# Altium footprint library SYNCBOX_V3I1.PcbLib: 251 footprints (part 7 of 16)
Each footprint in its own frame and in the unit in brackets; x right, y up, seen from the top. Pads: shape width x height; smd on the part's side, far side on the other; paste and mask are expansions set on the pad; w line width, h text height; cw(c..) or ccw(c..) is an arc to the next point about the centre after c.
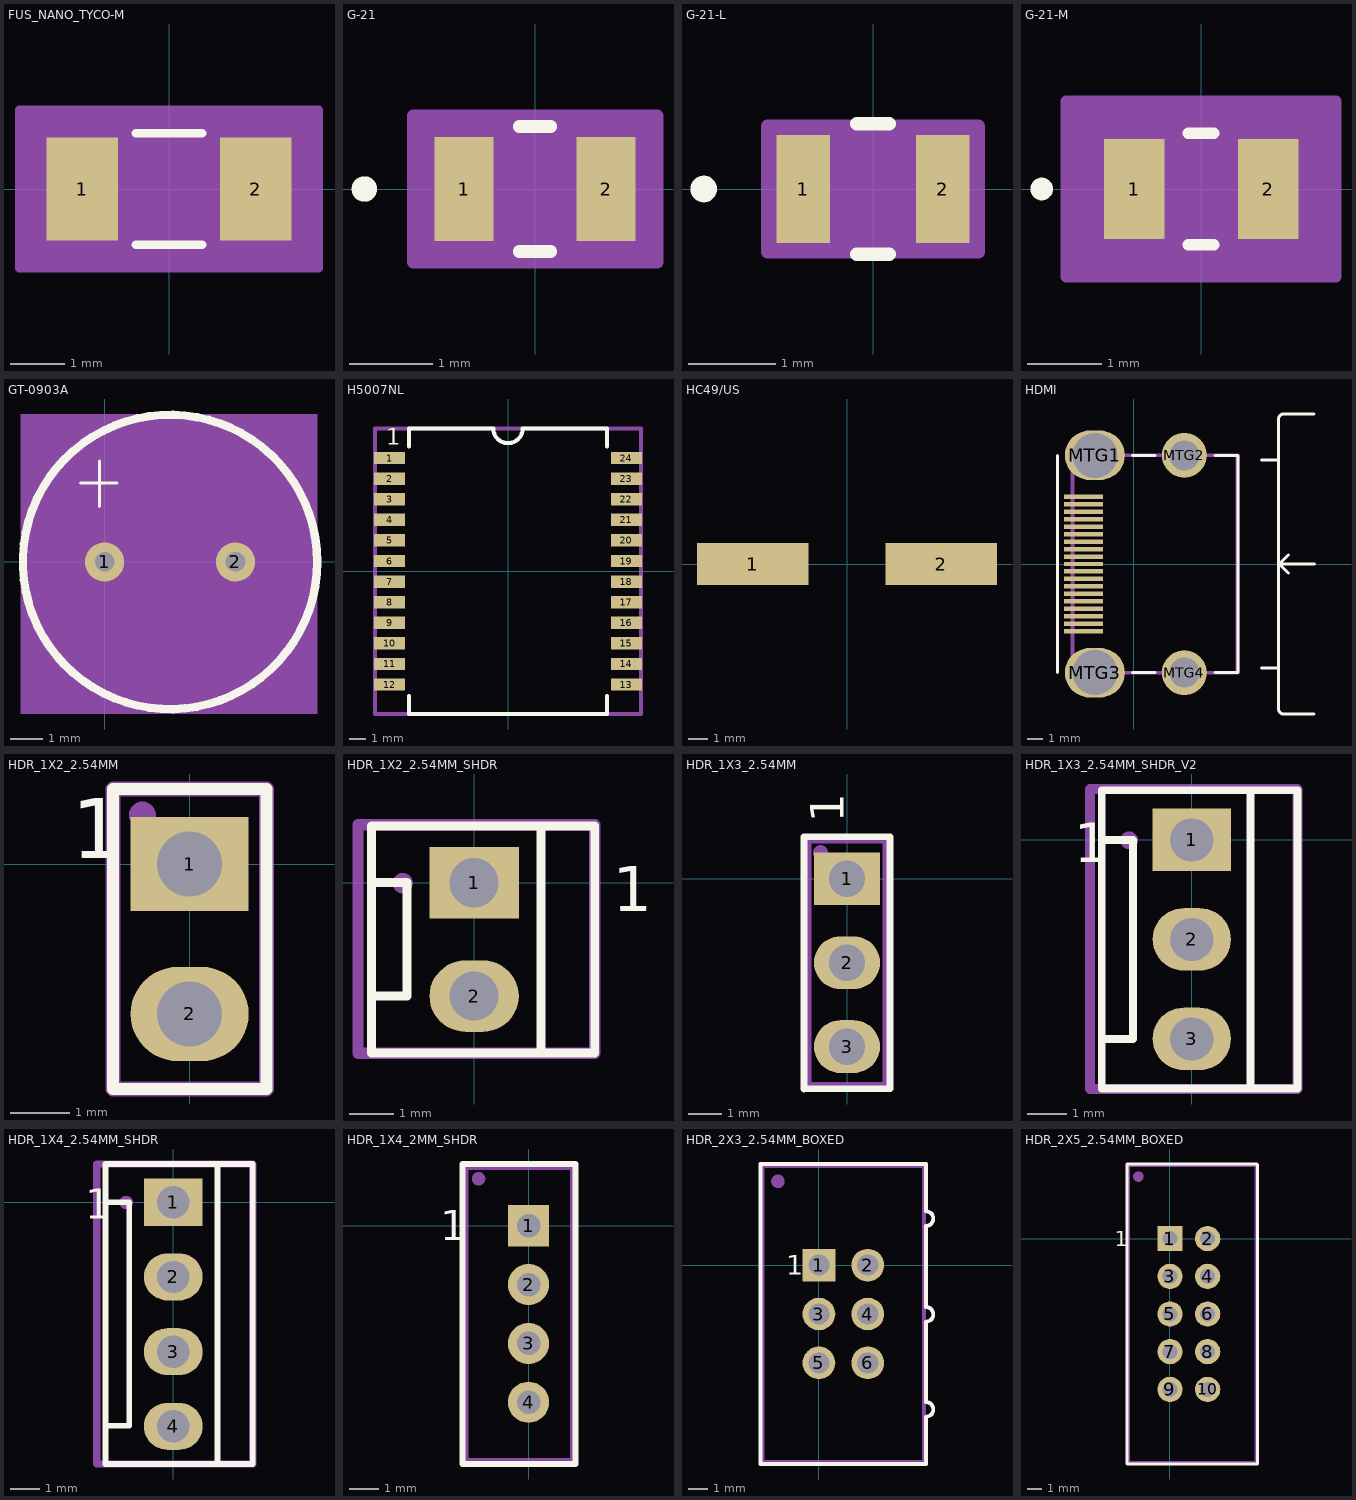
[diagram p6: the footprints below, top view; thin cyan lines are the x and y axes]

## FUS_NANO_TYCO-M [mil]
pads (2):
  rect 52x75 smd paste+0 mask+0: 1(-63,0) 2(63,0)
Top Overlay:
  lines w6: -24.25,-40.5 24.25,-40.5 ; -24.25,40.5 24.25,40.5
Mechanical 13:
  lines w1: -67,-35.5 -67,35.5 ; -67,-35.5 -37,-35.5 -37,35.5 -67,35.5 ; -67,-35.5 67,-35.5 ; -67,-35.5 -67,35.5 ; -67,35.5 67,35.5 ; 67,-35.5 37,-35.5 37,35.5 67,35.5 ; 67,-35.5 67,35.5 ; 67,-35.5 67,35.5
Mechanical 15:
  region: 109,-57.5 -109,-57.5 -109,57.5 109,57.5
  lines w6: -109,-57.5 -109,57.5 109,57.5 109,-57.5 -109,-57.5
3D body "FUS_NANO_TYCO-M.step": height 39.02, standoff 0, extent -67,-35.51 67.01,35.51
3D body: height 10, standoff 0, extent 0,0 10,10

## G-21 [mil]
pads (2):
  rect 28x49 smd paste+0 mask+0: 1(-33.5,0) 2(33.5,0)
Top Overlay:
  circle w6: c-80.5,0 r3
  lines w6: -7.39,-29.5 7.39,-29.5 ; -7.39,29.5 7.39,29.5
Mechanical 13:
  circle w0: c-28.5,0 r3
  lines w1: -39.5,-24.5 -39.5,24.5 ; -39.5,-24.5 39.5,-24.5 ; -39.5,-24.5 -19.5,-24.5 -19.5,24.5 -39.5,24.5 ; -39.5,-24.5 -39.5,24.5 ; -39.5,24.5 39.5,24.5 ; 39.5,-24.5 39.5,24.5 ; 39.5,-24.5 39.5,24.5 ; 39.5,-24.5 19.5,-24.5 19.5,24.5 39.5,24.5
Mechanical 15:
  region: 57.5,-34.5 -57.5,-34.5 -57.5,34.5 57.5,34.5
  lines w6: -57.5,-34.5 57.5,-34.5 57.5,34.5 -57.5,34.5 -57.5,-34.5
3D body "G-21.stp": height 57.01, standoff 0, extent -39.49,-24.49 39.49,24.49
3D body: height 10, standoff 0, extent 0,0 10,10

## G-21-L [mil]
pads (2):
  rect 24x49 smd paste+0 mask+0: 1(-31.5,0) 2(31.5,0)
Top Overlay:
  circle w6: c-76.5,0 r3
  lines w6: -7.39,-29.5 7.39,-29.5 ; -7.39,29.5 7.39,29.5
Mechanical 13:
  circle w0: c-26.5,0 r3
  lines w1: -39.5,-24.5 -39.5,24.5 ; -39.5,-24.5 39.5,-24.5 ; -39.5,-24.5 -19.5,-24.5 -19.5,24.5 -39.5,24.5 ; -39.5,-24.5 -39.5,24.5 ; -39.5,24.5 39.5,24.5 ; 39.5,-24.5 39.5,24.5 ; 39.5,-24.5 39.5,24.5 ; 39.5,-24.5 19.5,-24.5 19.5,24.5 39.5,24.5
Mechanical 15:
  region: 47.5,-28.5 -47.5,-28.5 -47.5,28.5 47.5,28.5
  lines w6: -47.5,-28.5 47.5,-28.5 47.5,28.5 -47.5,28.5 -47.5,-28.5
3D body: height 10, standoff 0, extent 0,0 10,10
3D body "G-21-L.stp": height 57.01, standoff 0, extent -39.48,-24.49 39.49,24.49

## G-21-M [mil]
pads (2):
  rect 32x53 smd paste+0 mask+0: 1(-35.5,0) 2(35.5,0)
Top Overlay:
  circle w6: c-84.5,0 r3
  lines w6: -6.75,-29.5 6.75,-29.5 ; -6.75,29.5 6.75,29.5
Mechanical 13:
  circle w0: c-30.5,0 r3
  lines w1: -39.5,-24.5 -39.5,24.5 ; -39.5,-24.5 39.5,-24.5 ; -39.5,-24.5 -19.5,-24.5 -19.5,24.5 -39.5,24.5 ; -39.5,-24.5 -39.5,24.5 ; -39.5,24.5 39.5,24.5 ; 39.5,-24.5 39.5,24.5 ; 39.5,-24.5 39.5,24.5 ; 39.5,-24.5 19.5,-24.5 19.5,24.5 39.5,24.5
Mechanical 15:
  region: 71.5,-46.5 -71.5,-46.5 -71.5,46.5 71.5,46.5
  lines w6: -71.5,-46.5 71.5,-46.5 71.5,46.5 -71.5,46.5 -71.5,-46.5
3D body: height 10, standoff 0, extent 0,0 10,10
3D body "G-21-M.stp": height 57.01, standoff 0, extent -39.48,-24.49 39.49,24.49

## GT-0903A [mm]
pads (2):
  round 1.2 hole 0.6: 1(0,0) 2(4,0)
Top Overlay:
  circle w0.254: c2,0 r4.5
  lines w0.1: -0.737,2.413 0.381,2.413 ; -0.152,1.702 -0.152,3.073
Mechanical 15:
  rectangle: -2.565,-4.648 6.502,4.521
3D body "GT-0903A.step": height 4.21, standoff -4.8, extent -2.498,-4.551 6.502,4.449

## H5007NL [mil]
pads (24):
  rect 75x30 smd: 1(-287.5,275) 2(-287.5,225) 3(-287.5,175) 4(-287.5,125) 5(-287.5,75) 6(-287.5,25) 7(-287.5,-25) 8(-287.5,-75) 9(-287.5,-125) 10(-287.5,-175) 11(-287.5,-225) 12(-287.5,-275) 13(287.5,-275) 14(287.5,-225) 15(287.5,-175) 16(287.5,-125) 17(287.5,-75) 18(287.5,-25) 19(287.5,25) 20(287.5,75) 21(287.5,125) 22(287.5,175) 23(287.5,225) 24(287.5,275)
Top Overlay:
  lines w10: -240.16,-303.15 -240.16,-346.46 240.16,-346.46 240.16,-303.15 ; -240.16,303.15 -240.16,346.46 -37.66,346.46 ; -35.43,346.46 ccw(c0.01,346.46) 35.45,346.46 ; 37.66,346.46 240.16,346.46 240.16,303.15
  text "1" at -295.28,307.09 h40
Mechanical 16:
  circle w10: c-287.4,275.59 r3.94
  lines w10: -322.83,-346.46 322.83,-346.46 322.83,346.46 -322.83,346.46 -322.83,-346.46
Mechanical 29:
  text ".Designator" at -39.37,35.43 h60
3D body: height 216.93, standoff 0, extent -240.16,-346.46 240.16,346.46

## HC49/US [mm]
pads (2):
  rect 5.6x2.1 smd: 1(-4.75,0) 2(4.75,0)
3D body: height 4.2, standoff 0, extent -5.8,-2.45 5.8,2.45

## HDMI [mm]
pads (23):
  rect 2.6x0.3 smd mask+0.025: 1(-3.36,4.5) 2(-3.36,4) 3(-3.36,3.5) 4(-3.36,3) 5(-3.36,2.5) 6(-3.36,2) 7(-3.36,1.5) 8(-3.36,1) 9(-3.36,0.5) 10(-3.36,0) 11(-3.36,-0.5) 12(-3.36,-1) 13(-3.36,-1.5) 14(-3.36,-2) 15(-3.36,-2.5) 16(-3.36,-3) 17(-3.36,-3.5) 18(-3.36,-4) 19(-3.36,-4.5)
  oval 4x3.3 hole 3: MTG1(-2.6,7.25) MTG3(-2.6,-7.25)
  round 3 hole 2: MTG2(3.36,7.25) MTG4(3.36,-7.25)
Top Overlay:
  lines w0.2: -5.1,-7.25 -5.1,7.25 ; -0.1,-7.25 1.4,-7.25 ; -0.1,7.25 1.4,7.25 ; 5.4,-7.25 6.9,-7.25 6.95,-7.2 6.95,7.25 ; 5.4,7.25 6.9,7.25 ; 8.5,-6.95 9.65,-6.95 ; 8.5,6.95 9.65,6.95 ; 9.95,10 12,10 ; 10,10 ccw(c9.975,9.675) 9.65,9.7 9.65,-9.7 ccw(c9.975,-9.675) 10,-10 12,-10 ; 10.3,-0.6 9.7,0 ; 10.3,0.6 9.7,0 ; 12.05,0 9.7,0
Mechanical 1:
  text "NOTE: Holes are big and connector" at -6.5,12 h0.5
  text "doesnt fit on one place. Bottom" at -6.5,10.8 h0.5
  text "plastic may go over the board edge" at -6.6,9.6 h0.5
Mechanical 16:
  lines w0.254: -4.1,-7.25 -4.1,7.25 6.9,7.25 6.9,-7.25 -4.1,-7.25
Mechanical 29:
  text ".Designator" at 0.5,2.3 h1.52
3D body "471510001.stp": height 6.28, standoff -2.1, extent -4.2,-7.5 7.95,7.5

## HDR_1X2_2.54MM [mm]
pads (2):
  rect 2x1.6 hole 1.1: 1(0,0)
  oval 2x1.6 hole 1.1: 2(0,-2.54)
Top Overlay:
  lines w0.2: -1.3,-3.81 -1.3,1.27 1.3,1.27 1.3,-3.81 -1.3,-3.81
  text "1" at -2,0.1 h1.02
Mechanical 16:
  circle w0.254: c-0.8,0.83 r0.1
  lines w0.254: -1.3,-3.81 1.3,-3.81 1.3,1.27 -1.3,1.27 -1.3,-3.81
Mechanical 29:
  text ".Designator" at 0.5,-2.7 h1
3D body "77311-118-02lf.stp": height 8.4, standoff -3.1, extent -1.205,-3.62 1.205,1.06

## HDR_1X2_2.54MM_SHDR [mm]
pads (2):
  rect 2x1.6 hole 1.1: 1(0,0)
  oval 2x1.6 hole 1.1: 2(0,-2.54)
Top Overlay:
  lines w0.2: -2.3,-2.54 -1.5,-2.54 -1.5,0 -2.3,0 ; 1.5,-3.8 1.5,1.27 ; -2.3,-3.81 -2.3,1.27 2.7,1.27 2.7,-3.81 -2.3,-3.81
  text "1" at 3.1,-0.64 h1.02
Mechanical 16:
  circle w0.254: c-1.6,-0.01 r0.1
  lines w0.254: -2.6,-3.82 -2.6,1.3 2.7,1.3 2.7,-3.82 -2.6,-3.82
Mechanical 29:
  text ".Designator" at 0.5,-2.34 h1
3D body "76384-302LFc.stp": height 9.34, standoff -3.43, extent -2.6,-3.31 2.649,0.77

## HDR_1X3_2.54MM [mm]
pads (3):
  rect 2x1.6 hole 1.1: 1(0,0)
  oval 2x1.6 hole 1.1: 2(0,-2.54) 3(0,-5.08)
Top Overlay:
  lines w0.2: -1.3,-6.36 -1.3,1.27 1.3,1.27 1.3,-6.3 ; -1.3,-6.35 1.3,-6.35
  text "1" at -0.1,1.7 h1.02
Mechanical 16:
  circle w0.254: c-0.8,0.79 r0.1
  lines w0.254: -1.2,-6.27 -1.2,1.19 1.2,1.19 1.2,-6.27 -1.2,-6.27
Mechanical 29:
  text ".Designator" at 0.8,-4.5 h1.52
3D body "77311-y18-03_asm.stp": height 8.4, standoff -3.1, extent -1.2,-6.15 1.21,1.07

## HDR_1X3_2.54MM_SHDR_V2 [mm]
pads (3):
  rect 2x1.6 hole 1.1: 1(0,0)
  oval 2x1.6 hole 1.1: 2(0,-2.54) 3(0,-5.08)
Top Overlay:
  lines w0.2: -2.3,-5.08 -1.5,-5.08 -1.5,0 -2.3,0 ; 1.5,-6.35 1.5,1.27 ; -2.3,-6.35 2.7,-6.35 2.7,1.27 -2.3,1.27 -2.3,-6.35
  text "1" at -2.994,-0.57 h1.02
Mechanical 16:
  circle w0.254: c-1.6,-0.01 r0.1
  lines w0.254: -2.6,-6.36 -2.6,1.3 2.7,1.3 2.7,-6.36 -2.6,-6.36
Mechanical 29:
  text ".Designator" at -0.6,-0.9 h1.52
3D body "76384-303LFc.stp": height 9.34, standoff -3.43, extent -2.6,-5.85 2.649,0.77

## HDR_1X4_2.54MM_SHDR [mm]
pads (4):
  rect 2x1.6 hole 1.1: 1(0,0)
  oval 2x1.6 hole 1.1: 2(0,-2.54) 3(0,-5.08) 4(0,-7.62)
Top Overlay:
  lines w0.2: -2.3,-7.6 -1.5,-7.6 -1.5,0 -2.3,0 ; 1.5,-8.9 1.5,1.3 ; -2.3,-8.9 2.7,-8.9 2.7,1.3 -2.3,1.3 -2.3,-8.9
  text "1" at -2.994,-0.57 h1.02
Mechanical 16:
  circle w0.254: c-1.6,-0.01 r0.1
  lines w0.254: -2.6,-8.9 -2.6,1.3 2.7,1.3 2.7,-8.9 -2.6,-8.9
Mechanical 29:
  text ".Designator" at -1,-1.84 h1.52
3D body "76384-304lf.stp": height 9.34, standoff -3.43, extent -2.6,-8.39 2.649,0.77

## HDR_1X4_2MM_SHDR [mm]
pads (4):
  rect 1.4x1.4 hole 0.8: 1(0,0)
  round 1.4 hole 0.8: 2(0,-2) 3(0,-4) 4(0,-6)
Top Overlay:
  lines w0.2: -2.25,-8.1 -2.25,2.1 1.6,2.1 1.6,-8.1 -2.25,-8.1
  text "1" at -3,-0.5 h1.02
Mechanical 16:
  circle w0.254: c-1.7,1.6 r0.1
  lines w0.2: -2.15,-8 1.5,-8 1.5,2 -2.15,2 -2.15,-8
Mechanical 29:
  text ".Designator" at 0.5,-5.2 h1.52
3D body "532530470.stp": height 5.55, standoff -3.45, extent -2.15,-8 1.5,2

## HDR_2X3_2.54MM_BOXED [mm]
pads (6):
  rect 1.7x1.7 hole 1.1: 1(0,0)
  round 1.7 hole 1.1: 2(2.54,0) 3(0,-2.54) 4(2.54,-2.54) 5(0,-5.08) 6(2.54,-5.08)
Top Overlay:
  lines w0.2: 5.57,-10.34 -3.03,-10.34 -3.03,5.26 5.57,5.26 5.57,2.8 cw(c5.57,2.42) 5.57,2.04 5.57,-2.18 cw(c5.57,-2.56) 5.57,-2.94 5.57,-7.12 cw(c5.57,-7.5) 5.57,-7.88 5.57,-10.3
  text "1" at -1.7,-0.5 h1.02
Mechanical 16:
  circle w0.5: c-2.13,4.36 r0.1
  lines w0.2: -2.93,-10.24 5.47,-10.24 5.47,5.16 -2.93,5.16 -2.93,-10.24
Mechanical 29:
  text ".Designator" at 2,-4.5 h1.52
3D body "30306-6002.stp": height 8.89, standoff -3.17, extent -2.931,-10.155 5.883,5.06

## HDR_2X5_2.54MM_BOXED [mm]
pads (10):
  rect 1.7x1.7 hole 1: 1(0,0)
  round 1.7 hole 1: 2(2.54,0) 3(0,-2.54) 4(2.54,-2.54) 5(0,-5.08) 6(2.54,-5.08) 7(0,-7.62) 8(2.54,-7.62) 9(0,-10.16) 10(2.54,-10.16)
Top Overlay:
  lines w0.2: -2.9,-15.19 -2.9,5.03 5.86,5.03 5.89,5 5.89,-15.19 -2.9,-15.19
  text "1" at -3.73,-0.53 h1.02
Mechanical 16:
  circle w0.5: c-2.13,4.18 r0.1
  lines w0.2: -2.8,-15.09 -2.8,4.93 5.79,4.93 5.79,-15.09 -2.8,-15.09
Mechanical 29:
  text ".Designator" at 2,-7 h1.52
3D body "30310-6002.stp": height 8.89, standoff -3.17, extent -2.906,-15.22 5.908,5.075